# Altium footprint library 3 Motor Drives.PcbLib: 8 footprints
Each footprint in its own frame and in the unit in brackets; x right, y up, seen from the top. Pads: shape width x height; smd on the part's side, far side on the other; paste and mask are expansions set on the pad; w line width, h text height; cw(c..) or ccw(c..) is an arc to the next point about the centre after c.
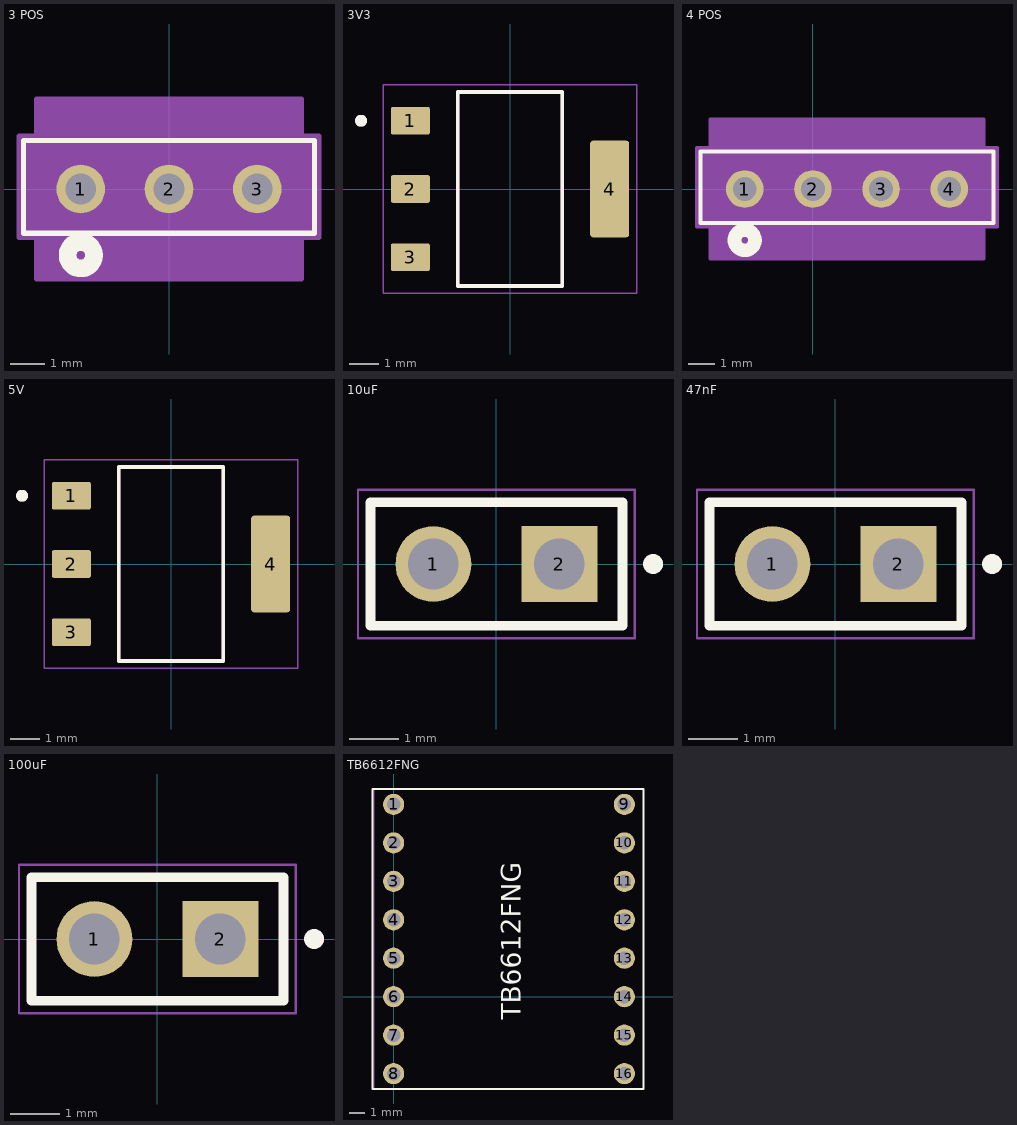
[diagram p0: the footprints below, top view; thin cyan lines are the x and y axes]

## 3 POS [mil]
pads (3):
  round 55 hole 35 paste-99999 mask+0: 1(-100,0) 2(0,0) 3(100,0)
Top Overlay:
  circle w20: c-100,-75 r15
  lines w6: -165,-50 165,-50 165,55 -165,55 -165,-50
  text ".Designator" at -137.5,-25 h50
Bottom Overlay:
  circle w20: c-100,-75 r15
Top 3D Body:
  circle w1: c-100,0 r10
  lines w1: -160,-45 160,-45 160,50 -160,50 -160,-45
  text ".Designator" at -137.5,-25 h50
Top Courtyard:
  region: 170,60 150,60 150,102 -150,102 -150,60 -170,60 -170,-55 -150,-55 -150,-102 150,-102 150,-55 170,-55
  lines w6: -170,-55 -170,60 -150,60 -150,102 150,102 150,60 170,60 170,-55 150,-55 150,-102 -150,-102 -150,-55 -170,-55
3D body "CON3_1X3_TU_TSW_SAI.step": height 500, standoff -200, extent -150,-50 150,50

## 3V3 [mm]
height 1.8
pads (4):
  rrect15% 1.31x0.93 smd: 1(-3.345,2.29) 2(-3.345,0) 3(-3.345,-2.29)
  rrect15% 1.31x3.24 smd: 4(3.345,0)
Top Overlay:
  circle w0.2: c-5,2.29 r0.1
  lines w0.127: -1.753,-3.253 -1.753,3.253 1.753,3.253 1.753,-3.253 -1.753,-3.253
Mechanical 13:
  circle w0.2: c-5,2.29 r0.1
  lines w0.127: -1.753,-3.253 -1.753,3.253 1.753,3.253 1.753,-3.253 -1.753,-3.253
Mechanical 15:
  lines w0.05: -4.25,-3.502 4.25,-3.502 4.25,3.502 -4.25,3.502 -4.25,-3.502
3D body "step_temp.STEP": height 1.8, standoff 0, extent -3.345,-3.251 3.653,3.251

## 4 POS [mil]
pads (4):
  round 55 hole 35 paste-99999 mask+0: 1(-100,0) 2(0,0) 3(100,0) 4(200,0)
Top Overlay:
  circle w20: c-100,-75 r15
  lines w6: -165,-50 265,-50 265,55 -165,55 -165,-50
  text ".Designator" at -87.5,-25 h50
Bottom Overlay:
  circle w20: c-100,-75 r15
Top 3D Body:
  circle w1: c-100,0 r10
  lines w1: -160,-45 260,-45 260,50 -160,50 -160,-45
  text ".Designator" at -87.5,-25 h50
Top Courtyard:
  region: 270,60 250,60 250,102 -150,102 -150,60 -170,60 -170,-55 -150,-55 -150,-102 250,-102 250,-55 270,-55
  lines w6: -170,-55 -170,60 -150,60 -150,102 250,102 250,60 270,60 270,-55 250,-55 250,-102 -150,-102 -150,-55 -170,-55
3D body "CON4_1X4_TU_TSW_SAI.step": height 500, standoff -200, extent -150,-50 250,50

## 5V [mm]
height 1.8
pads (4):
  rrect15% 1.31x0.93 smd: 1(-3.345,2.29) 2(-3.345,0) 3(-3.345,-2.29)
  rrect15% 1.31x3.24 smd: 4(3.345,0)
Top Overlay:
  circle w0.2: c-5,2.29 r0.1
  lines w0.127: -1.753,-3.253 1.753,-3.253 1.753,3.253 -1.753,3.253 -1.753,-3.253
Mechanical 13:
  circle w0.2: c-5,2.29 r0.1
  lines w0.127: -1.753,-3.253 1.753,-3.253 1.753,3.253 -1.753,3.253 -1.753,-3.253
Mechanical 15:
  lines w0.05: -4.25,-3.502 -4.25,3.502 4.25,3.502 4.25,-3.502 -4.25,-3.502
3D body "step_temp.STEP": height 1.8, standoff 0, extent -3.345,-3.251 3.653,3.251

## 10uF [mm]
pads (2):
  round 1.53 hole 1.02: 1(-1.27,0)
  rect 1.53x1.53 / inner round 1.53 / far side rect 1.53x1.53 hole 1.02: 2(1.27,0)
Top Overlay:
  circle w0.2: c3.16,0 r0.1
  lines w0.2: -2.54,-1.245 -2.54,1.245 2.54,1.245 2.54,-1.245 -2.54,-1.245
Top 3D Body:
  circle w0.2: c3.16,0 r0.1
  lines w0.1: -2.54,-1.245 -2.54,1.245 2.54,1.245 2.54,-1.245 -2.54,-1.245
Top Courtyard:
  lines w0.05: -2.79,-1.495 -2.79,1.495 2.79,1.495 2.79,-1.495 -2.79,-1.495

## 47nF [mm]
pads (2):
  round 1.53 hole 1.02: 1(-1.27,0)
  rect 1.53x1.53 / inner round 1.53 / far side rect 1.53x1.53 hole 1.02: 2(1.27,0)
Top Overlay:
  circle w0.2: c3.16,0 r0.1
  lines w0.2: -2.54,-1.245 2.54,-1.245 2.54,1.245 -2.54,1.245 -2.54,-1.245
Top 3D Body:
  circle w0.2: c3.16,0 r0.1
  lines w0.1: -2.54,-1.245 2.54,-1.245 2.54,1.245 -2.54,1.245 -2.54,-1.245
Top Courtyard:
  lines w0.05: -2.79,-1.495 2.79,-1.495 2.79,1.495 -2.79,1.495 -2.79,-1.495

## 100uF [mm]
pads (2):
  round 1.53 hole 1.02: 1(-1.27,0)
  rect 1.53x1.53 / inner round 1.53 / far side rect 1.53x1.53 hole 1.02: 2(1.27,0)
Top Overlay:
  circle w0.2: c3.16,0 r0.1
  lines w0.2: -2.54,-1.245 2.54,-1.245 2.54,1.245 -2.54,1.245 -2.54,-1.245
Top 3D Body:
  circle w0.2: c3.16,0 r0.1
  lines w0.1: -2.54,-1.245 2.54,-1.245 2.54,1.245 -2.54,1.245 -2.54,-1.245
Top Courtyard:
  lines w0.05: -2.79,-1.495 2.79,-1.495 2.79,1.495 -2.79,1.495 -2.79,-1.495

## TB6612FNG [mil]
pads (16):
  round 55 hole 35 paste-99999 mask+0: 1(0,500) 2(0,400) 3(0,300) 4(0,200) 5(0,100) 6(0,0) 7(0,-100) 8(0,-200) 9(600,500) 10(600,400) 11(600,300) 12(600,200) 13(600,100) 14(600,0) 15(600,-100) 16(600,-200)
Top Overlay:
  lines w6: -55,-240 650,-240 650,540 -55,540 -55,-240
  text "TB6612FNG" at 330,-60 h50
Top 3D Body:
  circle w1: c0,200 r10
  circle w1: c0,-200 r10
  lines w1: -50,-240 650,-240 650,540 -50,540 -50,-240
  text "TB6612FNG" at 330,-60 h50